# Altium footprint library Footprints.PcbLib: 34 footprints (part 1 of 3)
Each footprint in its own frame and in the unit in brackets; x right, y up, seen from the top. Pads: shape width x height; smd on the part's side, far side on the other; paste and mask are expansions set on the pad; w line width, h text height; cw(c..) or ccw(c..) is an arc to the next point about the centre after c.
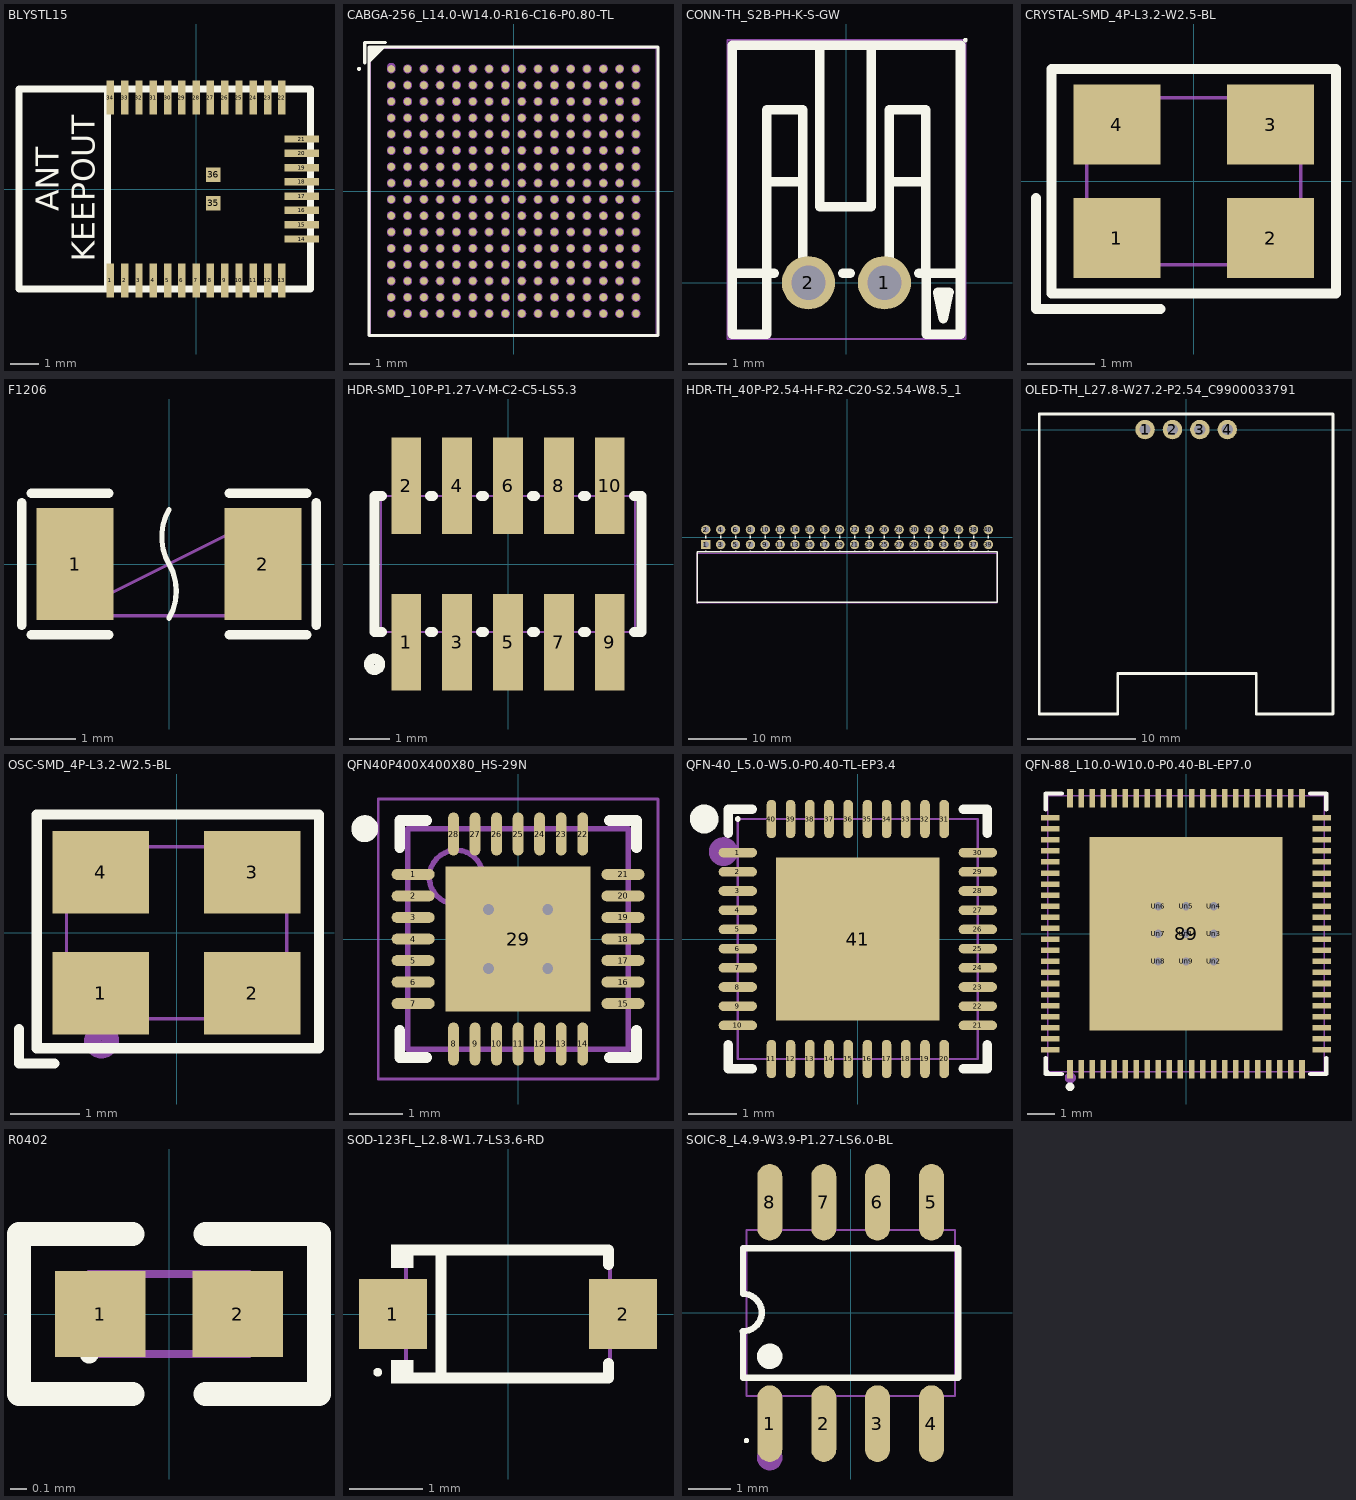
[diagram p0: the footprints below, top view; thin cyan lines are the x and y axes]

## BLYSTL15 [mm] "nRF54L15 Bluetooth LE Module"
height 1.6
pads (36):
  rect 0.26x1.2 smd: 1(-3,-3.2) 2(-2.5,-3.2) 3(-2,-3.2) 4(-1.5,-3.2) 5(-1,-3.2) 6(-0.5,-3.2) 7(0,-3.2) 8(0.5,-3.2) 9(1,-3.2) 10(1.5,-3.2) 11(2,-3.2) 12(2.5,-3.2) 13(3,-3.2) 22(3,3.2) 23(2.5,3.2) 24(2,3.2) 25(1.5,3.2) 26(1,3.2) 27(0.5,3.2) 28(0,3.2) 29(-0.5,3.2) 30(-1,3.2) 31(-1.5,3.2) 32(-2,3.2) 33(-2.5,3.2) 34(-3,3.2)
  rect 1.2x0.26 smd: 14(3.7,-1.75) 15(3.7,-1.25) 16(3.7,-0.75) 17(3.7,-0.25) 18(3.7,0.25) 19(3.7,0.75) 20(3.7,1.25) 21(3.7,1.75)
  rect 0.5x0.5 smd: 35(0.6,-0.5) 36(0.6,0.5)
F.SilkS:
  lines w0.254: -3.1,-3.5 -3.1,3.5 ; -6.2,-3.5 4,-3.5 4,3.5 -6.2,3.5 -6.2,-3.5
  text "ANT" at -4.8,-0.775 h0.8
  text "KEEPOUT" at -3.55,-2.55 h0.8
Multi-Layer:
  pour cut-out: -6.2,3.475 -3.1,3.475 -3.1,-3.5 -6.175,-3.5 -6.2,-3.525
3D body: height 0.5, standoff 0.01, extent -6.327,-3.627 4.127,3.627
3D body: height 1.6, standoff 0.5, extent -3.099,-3.499 3.999,3.499

## CABGA-256_L14.0-W14.0-R16-C16-P0.80-TL [mm]
pads (256):
  round 0.36 smd: A1(-6,6) A2(-5.2,6) A3(-4.4,6) A4(-3.6,6) A5(-2.8,6) A6(-2,6) A7(-1.2,6) A8(-0.4,6) A9(0.4,6) A10(1.2,6) A11(2,6) A12(2.8,6) A13(3.6,6) A14(4.4,6) A15(5.2,6) A16(6,6) B1(-6,5.2) B2(-5.2,5.2) B3(-4.4,5.2) B4(-3.6,5.2) B5(-2.8,5.2) B6(-2,5.2) B7(-1.2,5.2) B8(-0.4,5.2) B9(0.4,5.2) B10(1.2,5.2) B11(2,5.2) B12(2.8,5.2) B13(3.6,5.2) B14(4.4,5.2) B15(5.2,5.2) B16(6,5.2) C1(-6,4.4) C2(-5.2,4.4) C3(-4.4,4.4) C4(-3.6,4.4) C5(-2.8,4.4) C6(-2,4.4) C7(-1.2,4.4) C8(-0.4,4.4) C9(0.4,4.4) C10(1.2,4.4) C11(2,4.4) C12(2.8,4.4) C13(3.6,4.4) C14(4.4,4.4) C15(5.2,4.4) C16(6,4.4) D1(-6,3.6) D2(-5.2,3.6) D3(-4.4,3.6) D4(-3.6,3.6) D5(-2.8,3.6) D6(-2,3.6) D7(-1.2,3.6) D8(-0.4,3.6) D9(0.4,3.6) D10(1.2,3.6) D11(2,3.6) D12(2.8,3.6) D13(3.6,3.6) D14(4.4,3.6) D15(5.2,3.6) D16(6,3.6) E1(-6,2.8) E2(-5.2,2.8) E3(-4.4,2.8) E4(-3.6,2.8) E5(-2.8,2.8) E6(-2,2.8) E7(-1.2,2.8) E8(-0.4,2.8) E9(0.4,2.8) E10(1.2,2.8) E11(2,2.8) E12(2.8,2.8) E13(3.6,2.8) E14(4.4,2.8) E15(5.2,2.8) E16(6,2.8) F1(-6,2) F2(-5.2,2) F3(-4.4,2) F4(-3.6,2) F5(-2.8,2) F6(-2,2) F7(-1.2,2) F8(-0.4,2) F9(0.4,2) F10(1.2,2) F11(2,2) F12(2.8,2) F13(3.6,2) F14(4.4,2) F15(5.2,2) F16(6,2) G1(-6,1.2) G2(-5.2,1.2) G3(-4.4,1.2) G4(-3.6,1.2) G5(-2.8,1.2) G6(-2,1.2) G7(-1.2,1.2) G8(-0.4,1.2) G9(0.4,1.2) G10(1.2,1.2) G11(2,1.2) G12(2.8,1.2) G13(3.6,1.2) G14(4.4,1.2) G15(5.2,1.2) G16(6,1.2) H1(-6,0.4) H2(-5.2,0.4) H3(-4.4,0.4) H4(-3.6,0.4) H5(-2.8,0.4) H6(-2,0.4) H7(-1.2,0.4) H8(-0.4,0.4) H9(0.4,0.4) H10(1.2,0.4) H11(2,0.4) H12(2.8,0.4) H13(3.6,0.4) H14(4.4,0.4) H15(5.2,0.4) H16(6,0.4) J1(-6,-0.4) J2(-5.2,-0.4) J3(-4.4,-0.4) J4(-3.6,-0.4) J5(-2.8,-0.4) J6(-2,-0.4) J7(-1.2,-0.4) J8(-0.4,-0.4) J9(0.4,-0.4) J10(1.2,-0.4) J11(2,-0.4) J12(2.8,-0.4) J13(3.6,-0.4) J14(4.4,-0.4) J15(5.2,-0.4) J16(6,-0.4) K1(-6,-1.2) K2(-5.2,-1.2) K3(-4.4,-1.2) K4(-3.6,-1.2) K5(-2.8,-1.2) K6(-2,-1.2) K7(-1.2,-1.2) K8(-0.4,-1.2) K9(0.4,-1.2) K10(1.2,-1.2) K11(2,-1.2) K12(2.8,-1.2) K13(3.6,-1.2) K14(4.4,-1.2) K15(5.2,-1.2) K16(6,-1.2) L1(-6,-2) L2(-5.2,-2) L3(-4.4,-2) L4(-3.6,-2) L5(-2.8,-2) L6(-2,-2) L7(-1.2,-2) L8(-0.4,-2) L9(0.4,-2) L10(1.2,-2) L11(2,-2) L12(2.8,-2) L13(3.6,-2) L14(4.4,-2) L15(5.2,-2) L16(6,-2) M1(-6,-2.8) M2(-5.2,-2.8) M3(-4.4,-2.8) M4(-3.6,-2.8) M5(-2.8,-2.8) M6(-2,-2.8) M7(-1.2,-2.8) M8(-0.4,-2.8) M9(0.4,-2.8) M10(1.2,-2.8) M11(2,-2.8) M12(2.8,-2.8) M13(3.6,-2.8) M14(4.4,-2.8) M15(5.2,-2.8) M16(6,-2.8) N1(-6,-3.6) N2(-5.2,-3.6) N3(-4.4,-3.6) N4(-3.6,-3.6) N5(-2.8,-3.6) N6(-2,-3.6) N7(-1.2,-3.6) N8(-0.4,-3.6) N9(0.4,-3.6) N10(1.2,-3.6) N11(2,-3.6) N12(2.8,-3.6) N13(3.6,-3.6) N14(4.4,-3.6) N15(5.2,-3.6) N16(6,-3.6) P1(-6,-4.4) P2(-5.2,-4.4) P3(-4.4,-4.4) P4(-3.6,-4.4) P5(-2.8,-4.4) P6(-2,-4.4) P7(-1.2,-4.4) P8(-0.4,-4.4) P9(0.4,-4.4) P10(1.2,-4.4) P11(2,-4.4) P12(2.8,-4.4) P13(3.6,-4.4) P14(4.4,-4.4) P15(5.2,-4.4) P16(6,-4.4) R1(-6,-5.2) R2(-5.2,-5.2) R3(-4.4,-5.2) R4(-3.6,-5.2) R5(-2.8,-5.2) R6(-2,-5.2) R7(-1.2,-5.2) R8(-0.4,-5.2) R9(0.4,-5.2) R10(1.2,-5.2) R11(2,-5.2) R12(2.8,-5.2) R13(3.6,-5.2) R14(4.4,-5.2) R15(5.2,-5.2) R16(6,-5.2) T1(-6,-6) T2(-5.2,-6) T3(-4.4,-6) T4(-3.6,-6) T5(-2.8,-6) T6(-2,-6) T7(-1.2,-6) T8(-0.4,-6) T9(0.4,-6) T10(1.2,-6) T11(2,-6) T12(2.8,-6) T13(3.6,-6) T14(4.4,-6) T15(5.2,-6) T16(6,-6)
F.SilkS:
  circle w0.1: c-7.58,6 r0.05
  circle w0.06: c-7,7 r0.03
  region: -7.076,6.276 -7.076,7.076 -6.276,7.076
  lines w0.15: -7.3,6.28 -7.3,7.3 -6.28,7.3 ; -7.08,-7.08 -7.08,7.08 7.08,7.08 7.08,-7.08 -7.08,-7.08
Top Courtyard:
  lines w0.05: -7,-7 -7,7 7,7 7,-7 -7,-7
F.Fab:
  drawing of 256 lines, arcs and shapes, not listed
  text "'.Designator'" at -4.047,-0.84 h1
Cmts.User:
  circle w0.2: c-6,6.1 r0.1
3D body "CABGA-256_L14.0-W14.0-R16-C16-P0.80-TL.step": height 1.31, standoff -0.5, extent -7,-7 7,7

## CH347F [mm] "2 260uA 38mA 3V~3.6V 480Mbps USB 2.0 USB to UART、USB to SPI、USB to I2C、USB to JTAG、USB to SWD QFN-28(4X4) USB Converters ROHS"

## CONN-TH_S2B-PH-K-S-GW [mm]
pads (2):
  round 1.4 hole 0.9: 1(1,0) 2(-1,0)
F.SilkS:
  circle w0.06: c3.13,6.38 r0.03
  lines w0.25: -2.1,2.65 -1.15,2.65 ; -1.9,0.25 -3,0.25 ; -1.15,0.25 -1.15,4.55 -2.1,4.55 -2.1,0.25 -2.1,-1.35 -3,-1.35 -3,0.25 ; -0.7,6.25 -0.7,2 0.65,2 0.65,6.25 ; -0.1,0.25 0.1,0.25 ; 1.13,0.25 1.13,4.55 2.08,4.55 2.08,0.25 ; 1.13,2.65 2.08,2.65 ; 1.9,0.25 3,0.25 ; 2.1,0.25 2.1,-1.35 3,-1.35 3,0.25 ; -3,0.25 -3,6.25 3,6.25 3,0.25 ; 2.4,-0.25 2.55,-0.95 2.7,-0.25 2.4,-0.25
Top Courtyard:
  lines w0.05: -3.13,-1.48 -3.13,6.38 3.13,6.38 3.13,-1.48 -3.13,-1.48
F.Fab:
  circle w0.35: c-1,0 r0.18
  circle w0.35: c1,0 r0.18
  text "'.Designator'" at -4.047,-0.84 h1
3D body "CONN-TH_S2B-PH-K-S-GW.step": height 4.8, standoff -3.4, extent -2.95,-1.35 2.951,6.25

## CRYSTAL-SMD_4P-L3.2-W2.5-BL [mm]
pads (4):
  rect 1.3x1.2 smd: 1(-1.15,-0.85) 2(1.15,-0.85) 3(1.15,0.85) 4(-1.15,0.85)
F.SilkS:
  circle w0.06: c-1.6,-1.25 r0.03
  lines w0.15: -2.36,-0.25 -2.36,-1.91 -0.5,-1.91 ; -2.13,-1.68 -2.13,1.68 2.13,1.68 2.13,-1.68 -2.13,-1.68
Top Courtyard:
  lines w0.05: -1.6,-1.25 -1.6,1.25 1.6,1.25 1.6,-1.25 -1.6,-1.25
F.Fab:
  text "'.Designator'" at -4.047,-0.84 h1
Cmts.User:
  circle w0.25: c-1.27,-0.89 r0.13
3D body "CRYSTAL-SMD_4P-L3.2-W2.5-BL.step": height 0.7, standoff 0, extent -1.6,-1.25 1.6,1.25

## F1206 [mm]
pads (2):
  rect 1.19x1.728 smd: 1(-1.45,0) 2(1.45,0)
F.SilkS:
  circle w0.06: c-1.6,-0.8 r0.03
  lines w0.08: -0.001,0.002 cw(c-0.73,-0.42) 0,-0.84 ; 0,0.84 ccw(c0.73,0.42) 0.001,-0.002
  lines w0.15: -2.27,-0.94 -2.27,0.94 ; -2.12,-1.09 -0.93,-1.09 ; -2.12,1.09 -0.93,1.09 ; 0.93,-1.09 2.12,-1.09 ; 0.93,1.09 2.12,1.09 ; 2.27,-0.94 2.27,0.94
Top Courtyard:
  lines w0.05: -1.6,-0.8 1.6,-0.8 1.6,0.8 -1.6,-0.8
F.Fab:
  text "'.Designator'" at -4.047,-0.84 h1
3D body "F1206_L3.2-W1.7-H0.6.step": height 0.6, standoff 0, extent -1.6,-0.85 1.6,0.85

## HDR-SMD_10P-P1.27-V-M-C2-C5-LS5.3 [mm]
pads (10):
  rect 0.74x2.4 smd: 1(-2.54,-1.95) 2(-2.54,1.95) 3(-1.27,-1.95) 4(-1.27,1.95) 5(0,-1.95) 6(0,1.95) 7(1.27,-1.95) 8(1.27,1.95) 9(2.54,-1.95) 10(2.54,1.95)
F.SilkS:
  circle w0.25: c-3.33,-2.5 r0.14
  circle w0.06: c-3.17,-2.65 r0.02
  lines w0.25: -3.14,-1.7 -3.33,-1.7 -3.33,1.7 -3.14,1.7 ; -1.94,-1.7 -1.87,-1.7 ; -1.94,1.7 -1.87,1.7 ; -0.67,-1.7 -0.6,-1.7 ; -0.67,1.7 -0.6,1.7 ; 0.6,-1.7 0.67,-1.7 ; 0.6,1.7 0.67,1.7 ; 1.87,-1.7 1.94,-1.7 ; 1.87,1.7 1.94,1.7 ; 3.14,-1.7 3.33,-1.7 3.33,1.7 3.14,1.7
Top Courtyard:
  lines w0.05: -3.17,-1.7 3.17,-1.7 3.17,1.7 -3.17,1.7 -3.17,-1.7
F.Fab:
  text "'.Designator'" at -4.047,-0.84 h1
3D body "HDR-SMD_10P-P1.27-V-M-C2-C5-LS5.3.step": height 5, standoff -0.5, extent -3.175,-2.65 3.185,2.65

## HDR-TH_40P-P2.54-H-F-R2-C20-S2.54-W8.5_1 [mm]
pads (40):
  rect 1.6x1.6 hole 1.02: 1(-24.13,-1.27)
  round 1.6 hole 1.02: 2(-24.13,1.27) 3(-21.59,-1.27) 4(-21.59,1.27) 5(-19.05,-1.27) 6(-19.05,1.27) 7(-16.51,-1.27) 8(-16.51,1.27) 9(-13.97,-1.27) 10(-13.97,1.27) 11(-11.43,-1.27) 12(-11.43,1.27) 13(-8.89,-1.27) 14(-8.89,1.27) 15(-6.35,-1.27) 16(-6.35,1.27) 17(-3.81,-1.27) 18(-3.81,1.27) 19(-1.27,-1.27) 20(-1.27,1.27) 21(1.27,-1.27) 22(1.27,1.27) 23(3.81,-1.27) 24(3.81,1.27) 25(6.35,-1.27) 26(6.35,1.27) 27(8.89,-1.27) 28(8.89,1.27) 29(11.43,-1.27) 30(11.43,1.27) 31(13.97,-1.27) 32(13.97,1.27) 33(16.51,-1.27) 34(16.51,1.27) 35(19.05,-1.27) 36(19.05,1.27) 37(21.59,-1.27) 38(21.59,1.27) 39(24.13,-1.27) 40(24.13,1.27)
F.SilkS:
  circle w0.06: c-25.6,-11.23 r0.03
  lines w0.25: -24.13,-2.51 -24.13,-2.3 ; -24.13,-0.24 -24.13,0.24 ; -21.59,-2.51 -21.59,-2.3 ; -21.59,-0.24 -21.59,0.24 ; -19.05,-2.51 -19.05,-2.3 ; -19.05,-0.24 -19.05,0.24 ; -16.51,-2.51 -16.51,-2.3 ; -16.51,-0.24 -16.51,0.24 ; -13.97,-2.51 -13.97,-2.3 ; -13.97,-0.24 -13.97,0.24 ; -11.43,-2.51 -11.43,-2.3 ; -11.43,-0.24 -11.43,0.24 ; -8.89,-2.51 -8.89,-2.3 ; -8.89,-0.24 -8.89,0.24 ; -6.35,-2.51 -6.35,-2.3 ; -6.35,-0.24 -6.35,0.24 ; -3.81,-2.51 -3.81,-2.3 ; -3.81,-0.24 -3.81,0.24 ; -1.27,-2.51 -1.27,-2.3 ; -1.27,-0.24 -1.27,0.24 ; 1.27,-2.51 1.27,-2.3 ; 1.27,-0.24 1.27,0.24 ; 3.81,-2.51 3.81,-2.3 ; 3.81,-0.24 3.81,0.24 ; 6.35,-2.51 6.35,-2.3 ; 6.35,-0.24 6.35,0.24 ; 8.89,-2.51 8.89,-2.3 ; 8.89,-0.24 8.89,0.24 ; 11.43,-2.51 11.43,-2.3 ; 11.43,-0.24 11.43,0.24 ; 13.97,-2.51 13.97,-2.3 ; 13.97,-0.24 13.97,0.24 ; 16.51,-2.51 16.51,-2.3 ; 16.51,-0.24 16.51,0.24 ; 19.05,-2.51 19.05,-2.3 ; 19.05,-0.24 19.05,0.24 ; 21.59,-2.51 21.59,-2.3 ; 21.59,-0.24 21.59,0.24 ; 24.13,-2.51 24.13,-2.3 ; 24.13,-0.24 24.13,0.24 ; -25.6,-11.11 25.6,-11.11 25.6,-2.51 -25.6,-2.51 -25.6,-11.11
Top Courtyard:
  lines w0.05: -25.6,-11.23 25.6,-11.23 25.6,-2.73 -25.6,-2.73 -25.6,-11.23
F.Fab:
  text "'.Designator'" at -4.047,-0.84 h1
3D body "HDR-TH_40P-P2.54-H-F-R2-C20-S2.54-W8.5_1.step": height 5.01, standoff -3.2, extent -25.6,-11.25 25.6,1.45

## OLED-TH_L27.8-W27.2-P2.54_C9900033791 [mm]
pads (4):
  round 1.8 hole 1.05: 1(-3.81,0) 2(-1.27,0) 3(1.27,0) 4(3.81,0)
F.SilkS:
  circle w0.06: c-13.6,-25.6 r0.03
  lines w0.25: -13.6,-26.36 -6.35,-26.36 -6.35,-22.61 6.5,-22.61 6.5,-26.36 13.6,-26.36 13.6,1.44 -13.6,1.44 -13.6,-26.36
Top Courtyard:
  lines w0.05: -13.6,-26.36 -6.35,-26.36 -6.35,-22.61 6.5,-22.61 6.5,-26.36 13.6,-26.36 13.6,1.44 -13.6,1.44 -13.6,-26.36
F.Fab:
  text "'.Designator'" at -4.047,-0.84 h1
3D body "OLED-TH_L27.8-W27.2-P2.54_C9900033791.step": height 5.5, standoff 2.38, extent -13.473,-26.346 13.727,1.454

## OSC-SMD_4P-L3.2-W2.5-BL [mm]
pads (4):
  rect 1.4x1.2 smd: 1(-1.1,-0.88) 2(1.1,-0.88) 3(1.1,0.88) 4(-1.1,0.88)
F.SilkS:
  circle w0.06: c-1.6,-1.25 r0.03
  lines w0.15: -2.29,-1.4 -2.29,-1.9 -1.78,-1.9 ; -2.03,-1.68 2.07,-1.68 2.07,1.72 -2.03,1.72 -2.03,-1.68
Top Courtyard:
  lines w0.05: -1.6,-1.25 1.6,-1.25 1.6,1.25 -1.6,1.25 -1.6,-1.25
F.Fab:
  text "'.Designator'" at -4.047,-0.84 h1
Cmts.User:
  circle w0.25: c-1.09,-1.57 r0.13
3D body "OSC-SMD_4P-L3.2-W2.5-H1.0.step": height 0.8, standoff -0.01, extent -1.6,-1.25 1.6,1.25

## QFN40P400X400X80_HS-29N [mm] "QFN, 28-Leads, Body 4.00x4.00mm, Pitch 0.40mm, Thermal Pad 2.70x2.70mm, IPC Medium Density"
height 0.8
pads (29):
  oval 0.8x0.2 smd: 1(-1.95,1.2) 2(-1.95,0.8) 3(-1.95,0.4) 4(-1.95,0) 5(-1.95,-0.4) 6(-1.95,-0.8) 7(-1.95,-1.2) 15(1.95,-1.2) 16(1.95,-0.8) 17(1.95,-0.4) 18(1.95,0) 19(1.95,0.4) 20(1.95,0.8) 21(1.95,1.2)
  oval 0.2x0.8 smd: 8(-1.2,-1.95) 9(-0.8,-1.95) 10(-0.4,-1.95) 11(0,-1.95) 12(0.4,-1.95) 13(0.8,-1.95) 14(1.2,-1.95) 22(1.2,1.95) 23(0.8,1.95) 24(0.4,1.95) 25(0,1.95) 26(-0.4,1.95) 27(-0.8,1.95) 28(-1.2,1.95)
  rect 2.7x2.7 smd: 29(0,0)
via -0.55,0.55 diameter 0.5 hole 0.2
via 0.55,0.55 diameter 0.5 hole 0.2
via -0.55,-0.55 diameter 0.5 hole 0.2
via 0.55,-0.55 diameter 0.5 hole 0.2
F.SilkS:
  circle w0.25: c-2.85,2.05 r0.125
  lines w0.2: -2.2,-1.7 -2.2,-2.2 -1.7,-2.2 ; -2.2,1.7 -2.2,2.2 -1.7,2.2 ; 1.7,-2.2 2.2,-2.2 2.2,-1.7 ; 1.7,2.2 2.2,2.2 2.2,1.7
Top Assembly:
  circle w0.1: c-1.15,1.15 r0.5
  lines w0.1: -2.05,-2.05 -2.05,2.05 2.05,2.05 2.05,-2.05 -2.05,-2.05
Top Courtyard:
  lines w0.05: -2.6,-2.6 -2.6,2.6 2.6,2.6 2.6,-2.6 -2.6,-2.6
  lines w0.1: -0.5,0 0.5,0 ; 0,-0.5 0,0.5
3D body "QFN40P400X400X80_HS-29N.step": height 0.8, standoff 0, extent -2.075,-2.075 2.075,2.075

## QFN-40_L5.0-W5.0-P0.40-TL-EP3.4 [mm]
pads (41):
  rrect100% 0.8x0.2 smd: 1(-2.5,1.8) 2(-2.5,1.4) 3(-2.5,1) 4(-2.5,0.6) 5(-2.5,0.2) 6(-2.5,-0.2) 7(-2.5,-0.6) 8(-2.5,-1) 9(-2.5,-1.4) 10(-2.5,-1.8) 21(2.5,-1.8) 22(2.5,-1.4) 23(2.5,-1) 24(2.5,-0.6) 25(2.5,-0.2) 26(2.5,0.2) 27(2.5,0.6) 28(2.5,1) 29(2.5,1.4) 30(2.5,1.8)
  rrect100% 0.2x0.8 smd: 11(-1.8,-2.5) 12(-1.4,-2.5) 13(-1,-2.5) 14(-0.6,-2.5) 15(-0.2,-2.5) 16(0.2,-2.5) 17(0.6,-2.5) 18(1,-2.5) 19(1.4,-2.5) 20(1.8,-2.5) 31(1.8,2.5) 32(1.4,2.5) 33(1,2.5) 34(0.6,2.5) 35(0.2,2.5) 36(-0.2,2.5) 37(-0.6,2.5) 38(-1,2.5) 39(-1.4,2.5) 40(-1.8,2.5)
  rect 3.4x3.4 smd: 41(0,0)
F.SilkS:
  circle w0.06: c-2.5,2.5 r0.03
  lines w0.2: -2.7,-2.2 -2.7,-2.7 -2.2,-2.7 ; -2.7,2.2 -2.7,2.7 -2.2,2.7 ; 2.2,-2.7 2.7,-2.7 2.7,-2.2 ; 2.2,2.7 2.7,2.7 2.7,2.2
  lines w0.3: -3.05,2.5 cw(c-3.2,2.5) -3.05,2.503
Top Courtyard:
  lines w0.05: -2.5,-2.5 2.5,-2.5 2.5,2.5 -2.5,2.5 -2.5,-2.5
F.Fab:
  text "'.Designator'" at -4.047,-0.84 h1
Cmts.User:
  circle w0.3: c-2.8,1.82 r0.15
3D body "QFN-40_L5.0-W5.0-H0.9-P0.4-TL-EP.step": height 0.85, standoff 0, extent -2.5,-2.5 2.5,2.5

## QFN-88_L10.0-W10.0-P0.40-BL-EP7.0 [mm]
pads (98):
  rect 0.2x0.665 smd: 1(-4.2,-4.91) 2(-3.8,-4.91) 3(-3.4,-4.91) 4(-3,-4.91) 5(-2.6,-4.91) 6(-2.2,-4.91) 7(-1.8,-4.91) 8(-1.4,-4.91) 9(-1,-4.91) 10(-0.6,-4.91) 11(-0.2,-4.91) 12(0.2,-4.91) 13(0.6,-4.91) 14(1,-4.91) 15(1.4,-4.91) 16(1.8,-4.91) 17(2.2,-4.91) 18(2.6,-4.91) 19(3,-4.91) 20(3.4,-4.91) 21(3.8,-4.91) 22(4.2,-4.91) 45(4.2,4.91) 46(3.8,4.91) 47(3.4,4.91) 48(3,4.91) 49(2.6,4.91) 50(2.2,4.91) 51(1.8,4.91) 52(1.4,4.91) 53(1,4.91) 54(0.6,4.91) 55(0.2,4.91) 56(-0.2,4.91) 57(-0.6,4.91) 58(-1,4.91) 59(-1.4,4.91) 60(-1.8,4.91) 61(-2.2,4.91) 62(-2.6,4.91) 63(-3,4.91) 64(-3.4,4.91) 65(-3.8,4.91) 66(-4.2,4.91)
  rect 0.665x0.2 smd: 23(4.91,-4.2) 24(4.91,-3.8) 25(4.91,-3.4) 26(4.91,-3) 27(4.91,-2.6) 28(4.91,-2.2) 29(4.91,-1.8) 30(4.91,-1.4) 31(4.91,-1) 32(4.91,-0.6) 33(4.91,-0.2) 34(4.91,0.2) 35(4.91,0.6) 36(4.91,1) 37(4.91,1.4) 38(4.91,1.8) 39(4.91,2.2) 40(4.91,2.6) 41(4.91,3) 42(4.91,3.4) 43(4.91,3.8) 44(4.91,4.2) 67(-4.91,4.2) 68(-4.91,3.8) 69(-4.91,3.4) 70(-4.91,3) 71(-4.91,2.6) 72(-4.91,2.2) 73(-4.91,1.8) 74(-4.91,1.4) 75(-4.91,1) 76(-4.91,0.6) 77(-4.91,0.2) 78(-4.91,-0.2) 79(-4.91,-0.6) 80(-4.91,-1) 81(-4.91,-1.4) 82(-4.91,-1.8) 83(-4.91,-2.2) 84(-4.91,-2.6) 85(-4.91,-3) 86(-4.91,-3.4) 87(-4.91,-3.8) 88(-4.91,-4.2)
  rect 7x7 smd: 89(0,0)
  round 0.61 hole 0.3: Un1(0,0) Un2(1,-1) Un3(1,0) Un4(1,1) Un5(0,1) Un6(-1,1) Un7(-1,0) Un8(-1,-1) Un9(0,-1)
F.SilkS:
  circle w0.15: c-4.2,-5.54 r0.08
  circle w0.06: c-5,-5 r0.03
  lines w0.15: -5.08,-4.5 -5.08,-5.08 -4.5,-5.08 ; -5.08,4.5 -5.08,5.08 -4.5,5.08 ; 4.5,-5.08 5.08,-5.08 5.08,-4.5 ; 4.5,5.08 5.08,5.08 5.08,4.5
Top Courtyard:
  lines w0.05: -5,-5 5,-5 5,5 -5,5 -5,-5
F.Fab:
  text "'.Designator'" at -4.047,-0.84 h1
Cmts.User:
  circle w0.2: c-4.19,-5.21 r0.1
3D body "QFN-88_L10.0-W10.0-P0.40-BL-EP7.0.step": height 0.76, standoff -0.03, extent -5.01,-5.01 5.01,5.01

## R0402 [mm]
pads (2):
  rect 0.566x0.54 smd: 1(-0.43,0) 2(0.43,0)
F.SilkS:
  circle w0.06: c-0.5,-0.25 r0.03
  lines w0.15: -0.23,-0.5 -0.94,-0.5 -0.94,0.5 -0.23,0.5 ; 0.23,-0.5 0.94,-0.5 0.94,0.5 0.23,0.5
Top Courtyard:
  lines w0.05: -0.5,-0.25 -0.5,0.25 0.5,0.25 0.5,-0.25 -0.5,-0.25
F.Fab:
  text "'.Designator'" at -4.047,-0.84 h1
3D body "R0402_L1.0-W0.5-H0.4.step": height 0.36, standoff 0, extent -0.5,-0.25 0.5,0.251

## SOD-123FL_L2.8-W1.7-LS3.6-RD [mm]
pads (2):
  rect 0.93x0.96 smd: 1(-1.58,0) 2(1.58,0)
F.SilkS:
  circle w0.06: c-1.79,-0.8 r0.03
  region: -1.3,-0.952 -1.605,-0.952 -1.605,-0.632 -1.3,-0.632
  region: -1.3,0.632 -1.605,0.632 -1.605,0.952 -1.3,0.952
  lines w0.15: -1.38,-0.88 1.38,-0.88 1.38,-0.68 ; -1.38,0.88 1.38,0.88 1.38,0.68 ; -0.92,-0.88 -0.92,0.88
Top Courtyard:
  lines w0.05: -1.4,-0.85 -1.4,0.85 1.4,0.85 1.4,-0.85 -1.4,-0.85
F.Fab:
  text "'.Designator'" at -4.047,-0.84 h1
3D body "SOD-123FL_L2.8-W1.7-LS3.6-RD.step": height 1.2, standoff -0.11, extent -1.85,-0.9 1.85,0.9

## SOIC-8_L4.9-W3.9-P1.27-LS6.0-BL [mm]
pads (8):
  rrect100% 0.588x1.8 smd: 1(-1.9,-2.6) 2(-0.63,-2.6) 3(0.63,-2.6) 4(1.9,-2.6) 5(1.9,2.6) 6(0.63,2.6) 7(-0.63,2.6) 8(-1.9,2.6)
F.SilkS:
  circle w0.06: c-2.45,-3 r0.03
  circle w0.3: c-1.9,-1.02 r0.15
  lines w0.15: -2.531,-0.43 ccw(c-2.53,0.01) -2.53,0.45 -2.53,1.52 ; -2.53,-0.44 -2.53,-1.52 ; -2.07,-1.52 -2.53,-1.52 ; -2.07,1.52 -2.53,1.52 ; -1.74,-1.52 -0.8,-1.52 ; -1.74,1.52 -0.8,1.52 ; -0.47,-1.52 0.47,-1.52 ; -0.47,1.52 0.47,1.52 ; 0.8,-1.52 1.74,-1.52 ; 0.8,1.52 1.74,1.52 ; 2.07,-1.52 2.53,-1.52 ; 2.07,1.52 2.53,1.52 ; -2.53,-1.52 2.53,-1.52 ; -2.53,1.52 2.53,1.52 ; 2.53,-1.52 2.53,1.52
Top Courtyard:
  lines w0.05: -2.45,-1.95 -2.45,1.95 2.45,1.95 2.45,-1.95 -2.45,-1.95
F.Fab:
  text "'.Designator'" at -4.047,-0.84 h1
Cmts.User:
  circle w0.3: c-1.9,-3.4 r0.15
3D body "SOIC-8_L4.9-W3.9-H1.7-LS6.0-P1.27.step": height 1.7, standoff 0, extent -2.45,-3 2.45,3